# Altium schematic symbol library APE-SBC.SchLib: 66 symbols
Pins are listed as number, name and electrical type; pins without a type are passive.

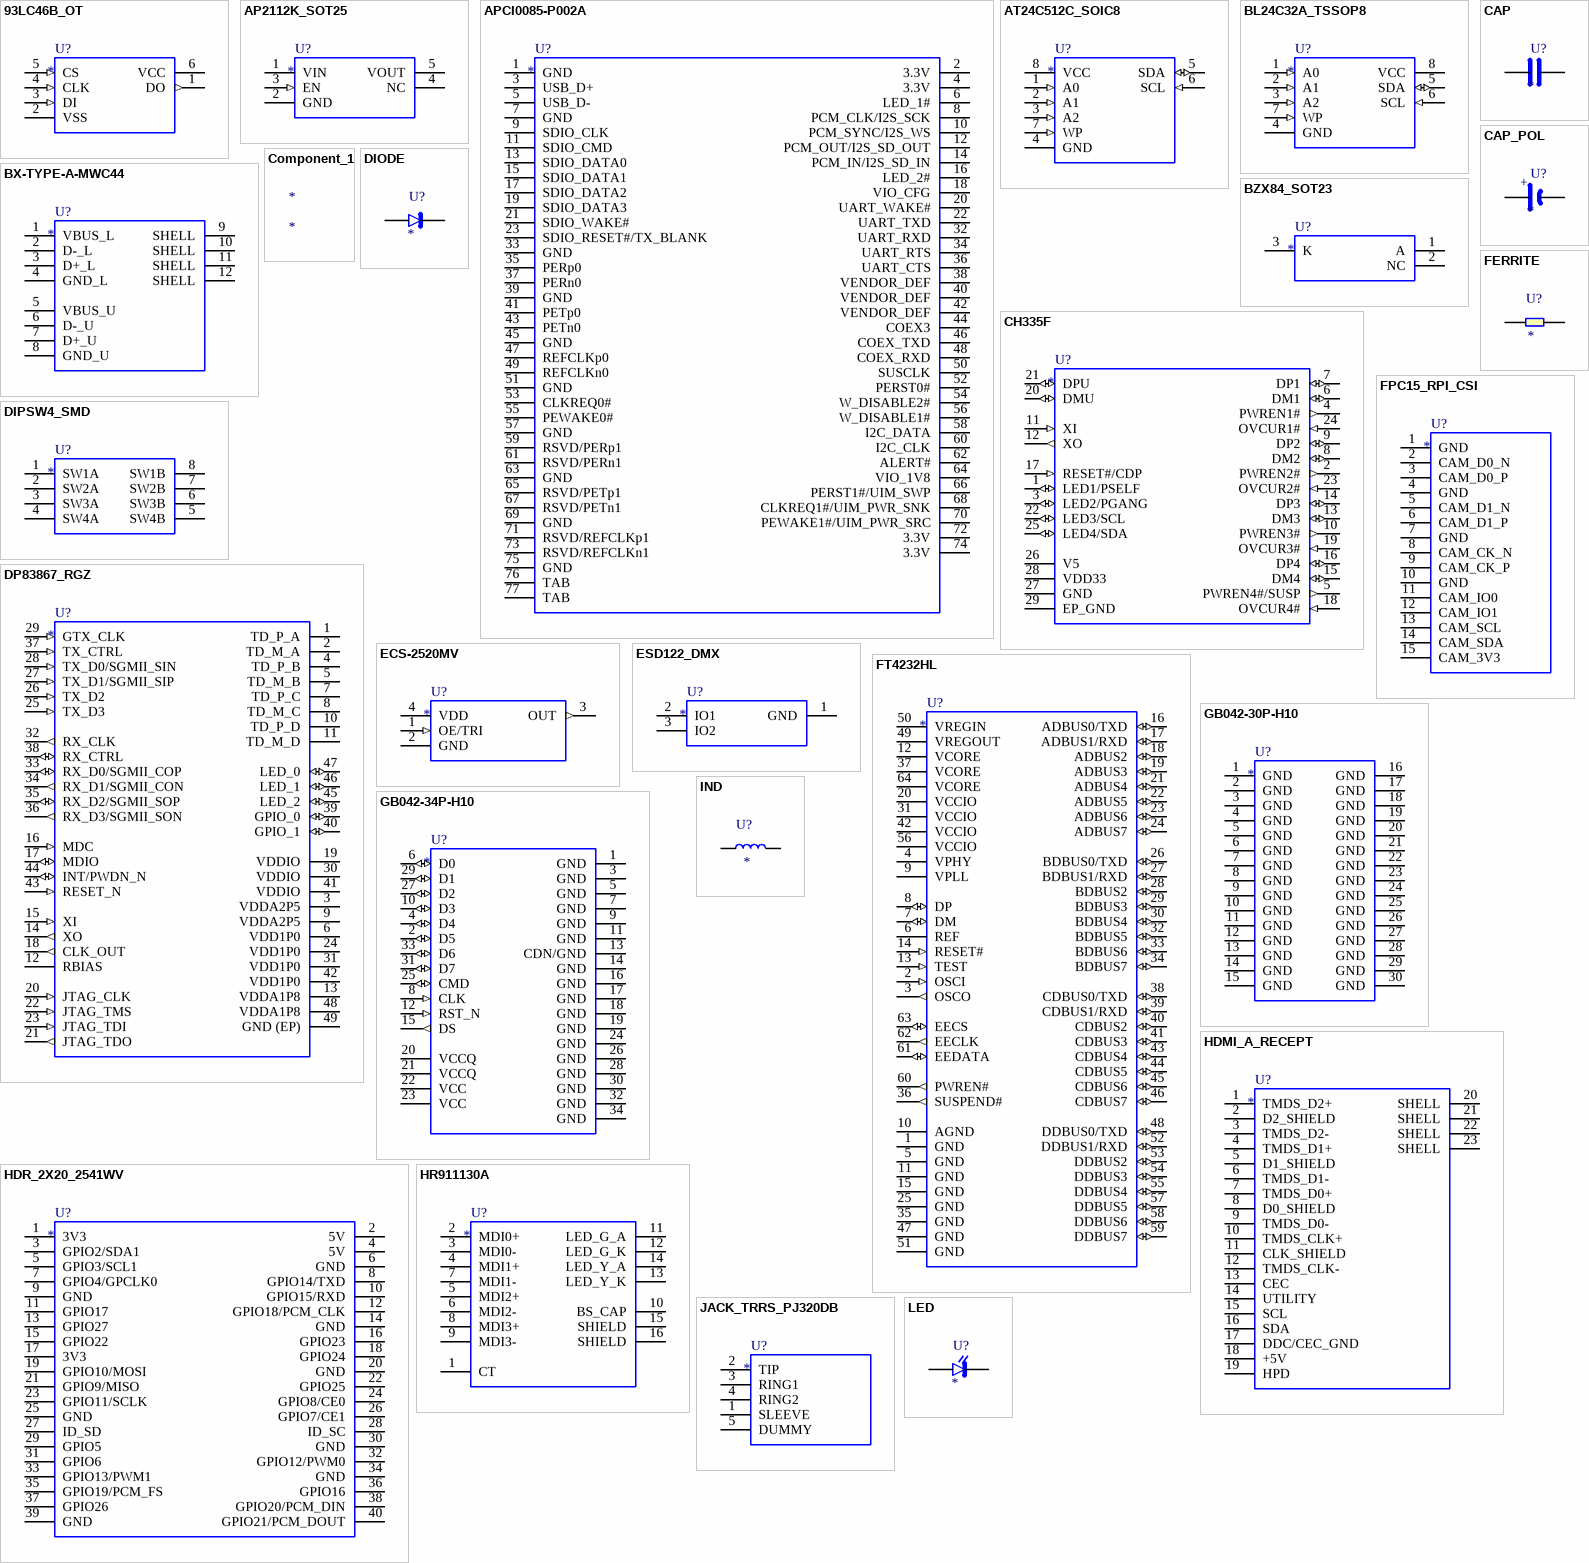
[diagram p0: symbols 93LC46B_OT to LED]

## 93LC46B_OT
designator U?
93LC46B 1 Kbit Microwire EEPROM (64 x 16), SOT-23-6
pins: 1 DO (out), 2 VSS (power), 3 DI (in), 4 CLK (in), 5 CS (in), 6 VCC (power)

## AP2112K_SOT25
designator U?
AP2112K 600 mA CMOS LDO, fixed output, SOT-23-5
pins: 1 VIN (power), 2 GND (power), 3 EN (in), 4 NC, 5 VOUT (power)

## APCI0085-P002A
designator U?
M.2 Key-E socket, 67 contacts 0.5 mm, H3.2, 2 SMT tabs (LOTES APCI0085-P002A)
pins: 1 GND (power), 2 3.3V (power), 3 USB_D+, 4 3.3V (power), 5 USB_D-, 6 LED_1#, 7 GND (power), 8 PCM_CLK/I2S_SCK, 9 SDIO_CLK, 10 PCM_SYNC/I2S_WS, 11 SDIO_CMD, 12 PCM_OUT/I2S_SD_OUT, 13 SDIO_DATA0, 14 PCM_IN/I2S_SD_IN, 15 SDIO_DATA1, 16 LED_2#, 17 SDIO_DATA2, 18 VIO_CFG, 19 SDIO_DATA3, 20 UART_WAKE#, 21 SDIO_WAKE#, 22 UART_TXD, 23 SDIO_RESET#/TX_BLANK, 32 UART_RXD, 33 GND (power), 34 UART_RTS, 35 PERp0, 36 UART_CTS, 37 PERn0, 38 VENDOR_DEF, 39 GND (power), 40 VENDOR_DEF, 41 PETp0, 42 VENDOR_DEF, 43 PETn0, 44 COEX3, 45 GND (power), 46 COEX_TXD, 47 REFCLKp0, 48 COEX_RXD, 49 REFCLKn0, 50 SUSCLK, 51 GND (power), 52 PERST0#, 53 CLKREQ0#, 54 W_DISABLE2#, 55 PEWAKE0#, 56 W_DISABLE1#, 57 GND (power), 58 I2C_DATA, 59 RSVD/PERp1, 60 I2C_CLK, 61 RSVD/PERn1, 62 ALERT#, 63 GND (power), 64 VIO_1V8 (power), 65 RSVD/PETp1, 66 PERST1#/UIM_SWP, 67 RSVD/PETn1, 68 CLKREQ1#/UIM_PWR_SNK, 69 GND (power), 70 PEWAKE1#/UIM_PWR_SRC, 71 RSVD/REFCLKp1, 72 3.3V (power), 73 RSVD/REFCLKn1, 74 3.3V (power), 75 GND (power), 76 TAB (power), 77 TAB (power)

## AT24C512C_SOIC8
designator U?
512 Kbit I2C EEPROM, SOIC-8 (SSHD: 2.5-5.5 V)
pins: 1 A0 (in), 2 A1 (in), 3 A2 (in), 4 GND (power), 5 SDA (io), 6 SCL (in), 7 WP (in), 8 VCC (power)

## BL24C32A_TSSOP8
designator U?
BL24C32A 32 Kbit I2C EEPROM (2-byte address), TSSOP-8
pins: 1 A0 (in), 2 A1 (in), 3 A2 (in), 4 GND (power), 5 SDA (io), 6 SCL (in), 7 WP (in), 8 VCC (power)

## BX-TYPE-A-MWC44
designator U?
Dual stacked USB 2.0 Type-A receptacle, THT right angle (Bossie BX-TYPE-A-MWC44)
pins: 1 VBUS_L (power), 2 D-_L, 3 D+_L, 4 GND_L (power), 5 VBUS_U (power), 6 D-_U, 7 D+_U, 8 GND_U (power), 9 SHELL, 10 SHELL, 11 SHELL, 12 SHELL

## BZX84_SOT23
designator U?
Zener diode SOT-23 (1 = anode, 2 = NC, 3 = cathode)
pins: 1 A, 2 NC, 3 K

## CAP
designator U?
Capacitor, non-polarized
pins: 1, 2

## CAP_POL
designator U?
Capacitor, polarized (pin 1 = +)
pins: 1, 2
text: +

## CH335F
designator U?
WCH CH335F USB 2.0 HS 4-port MTT hub, per-port power/OC, QFN-28 4x4
pins: 1 LED1/PSELF (io), 2 PWREN2# (out), 3 LED2/PGANG (io), 4 PWREN1# (out), 5 PWREN4#/SUSP (out), 6 DM1 (io), 7 DP1 (io), 8 DM2 (io), 9 DP2 (io), 10 PWREN3# (out), 11 XI (in), 12 XO (out), 13 DM3 (io), 14 DP3 (io), 15 DM4 (io), 16 DP4 (io), 17 RESET#/CDP (in), 18 OVCUR4# (in), 19 OVCUR3# (in), 20 DMU (io), 21 DPU (io), 22 LED3/SCL (io), 23 OVCUR2# (in), 24 OVCUR1# (in), 25 LED4/SDA (io), 26 V5 (power), 27 GND (power), 28 VDD33 (power), 29 EP_GND (power)

## Component_1
designator *

## DIODE
designator U?
Diode (pin 1 = anode)
pins: 1 A, 2 K

## DIPSW4_SMD
designator U?
DIP switch 4-position SPST, 2.54 mm SMD (pos k = pins k / 9-k)
pins: 1 SW1A, 2 SW2A, 3 SW3A, 4 SW4A, 5 SW4B, 6 SW3B, 7 SW2B, 8 SW1B

## DP83867_RGZ
designator U?
DP83867IS/E/CS 10/100/1000 Ethernet PHY, RGMII/SGMII, VQFN-48 RGZ
pins: 1 TD_P_A, 2 TD_M_A, 3 VDDA2P5 (power), 4 TD_P_B, 5 TD_M_B, 6 VDD1P0 (power), 7 TD_P_C, 8 TD_M_C, 9 VDDA2P5 (power), 10 TD_P_D, 11 TD_M_D, 12 RBIAS, 13 VDDA1P8 (power), 14 XO (out), 15 XI (in), 16 MDC (in), 17 MDIO (io), 18 CLK_OUT (out), 19 VDDIO (power), 20 JTAG_CLK (in), 21 JTAG_TDO (out), 22 JTAG_TMS (in), 23 JTAG_TDI (in), 24 VDD1P0 (power), 25 TX_D3 (in), 26 TX_D2 (in), 27 TX_D1/SGMII_SIP (in), 28 TX_D0/SGMII_SIN (in), 29 GTX_CLK (in), 30 VDDIO (power), 31 VDD1P0 (power), 32 RX_CLK (out), 33 RX_D0/SGMII_COP (io), 34 RX_D1/SGMII_CON (out), 35 RX_D2/SGMII_SOP (io), 36 RX_D3/SGMII_SON (out), 37 TX_CTRL (in), 38 RX_CTRL (io), 39 GPIO_0 (io), 40 GPIO_1 (io), 41 VDDIO (power), 42 VDD1P0 (power), 43 RESET_N (in), 44 INT/PWDN_N (io), 45 LED_2 (io), 46 LED_1 (io), 47 LED_0 (io), 48 VDDA1P8 (power), 49 GND (EP) (power)

## ECS-2520MV
designator U?
25 MHz HCMOS oscillator 1.6-3.6 V, 2.5x2.0 mm SMD-4
pins: 1 OE/TRI (in), 2 GND (power), 3 OUT (out), 4 VDD (power)

## ESD122_DMX
designator U?
ESD122 2-channel 0.2 pF bidirectional ESD diode, X2SON-3 (DMX)
pins: 1 GND (power), 2 IO1, 3 IO2

## FERRITE
designator U?
Ferrite bead
pins: 1, 2

## FPC15_RPI_CSI
designator U?
15-pin 1.0 mm FPC, Raspberry Pi camera pinout (TE 1-1734248-5)
pins: 1 GND, 2 CAM_D0_N, 3 CAM_D0_P, 4 GND, 5 CAM_D1_N, 6 CAM_D1_P, 7 GND, 8 CAM_CK_N, 9 CAM_CK_P, 10 GND, 11 CAM_IO0, 12 CAM_IO1, 13 CAM_SCL, 14 CAM_SDA, 15 CAM_3V3

## FT4232HL
designator U?
FT4232H quad Hi-Speed USB to UART/MPSSE, LQFP-64
pins: 1 GND (power), 2 OSCI (in), 3 OSCO (out), 4 VPHY (power), 5 GND (power), 6 REF, 7 DM (io), 8 DP (io), 9 VPLL (power), 10 AGND (power), 11 GND (power), 12 VCORE (power), 13 TEST (in), 14 RESET# (in), 15 GND (power), 16 ADBUS0/TXD (io), 17 ADBUS1/RXD (io), 18 ADBUS2 (io), 19 ADBUS3 (io), 20 VCCIO (power), 21 ADBUS4 (io), 22 ADBUS5 (io), 23 ADBUS6 (io), 24 ADBUS7 (io), 25 GND (power), 26 BDBUS0/TXD (io), 27 BDBUS1/RXD (io), 28 BDBUS2 (io), 29 BDBUS3 (io), 30 BDBUS4 (io), 31 VCCIO (power), 32 BDBUS5 (io), 33 BDBUS6 (io), 34 BDBUS7 (io), 35 GND (power), 36 SUSPEND# (out), 37 VCORE (power), 38 CDBUS0/TXD (io), 39 CDBUS1/RXD (io), 40 CDBUS2 (io), 41 CDBUS3 (io), 42 VCCIO (power), 43 CDBUS4 (io), 44 CDBUS5 (io), 45 CDBUS6 (io), 46 CDBUS7 (io), 47 GND (power), 48 DDBUS0/TXD (io), 49 VREGOUT (power), 50 VREGIN (power), 51 GND (power), 52 DDBUS1/RXD (io), 53 DDBUS2 (io), 54 DDBUS3 (io), 55 DDBUS4 (io), 56 VCCIO (power), 57 DDBUS5 (io), 58 DDBUS6 (io), 59 DDBUS7 (io), 60 PWREN# (out), 61 EEDATA (io), 62 EECLK (out), 63 EECS (io), 64 VCORE (power)

## GB042-30P-H10
designator U?
eMMC-module retention connector, LS Mtron GB042 30-pin 0.4 mm B2B plug (mechanical, all GND)
pins: 1 GND, 2 GND, 3 GND, 4 GND, 5 GND, 6 GND, 7 GND, 8 GND, 9 GND, 10 GND, 11 GND, 12 GND, 13 GND, 14 GND, 15 GND, 16 GND, 17 GND, 18 GND, 19 GND, 20 GND, 21 GND, 22 GND, 23 GND, 24 GND, 25 GND, 26 GND, 27 GND, 28 GND, 29 GND, 30 GND

## GB042-34P-H10
designator U?
eMMC-module connector, LS Mtron GB042 34-pin 0.4 mm B2B plug (Odroid/Radxa/PINE64 pinout)
pins: 1 GND (power), 2 D5 (io), 3 GND (power), 4 D4 (io), 5 GND (power), 6 D0 (io), 7 GND (power), 8 CLK (in), 9 GND (power), 10 D3 (io), 11 GND (power), 12 RST_N (in), 13 CDN/GND, 14 GND (power), 15 DS (out), 16 GND (power), 17 GND (power), 18 GND (power), 19 GND (power), 20 VCCQ (power), 21 VCCQ (power), 22 VCC (power), 23 VCC (power), 24 GND (power), 25 CMD (io), 26 GND (power), 27 D2 (io), 28 GND (power), 29 D1 (io), 30 GND (power), 31 D7 (io), 32 GND (power), 33 D6 (io), 34 GND (power)

## HDMI_A_RECEPT
designator U?
HDMI type-A receptacle, 19 pin + shell (XFCN HDMI-A-19F-S-D)
pins: 1 TMDS_D2+, 2 D2_SHIELD, 3 TMDS_D2-, 4 TMDS_D1+, 5 D1_SHIELD, 6 TMDS_D1-, 7 TMDS_D0+, 8 D0_SHIELD, 9 TMDS_D0-, 10 TMDS_CLK+, 11 CLK_SHIELD, 12 TMDS_CLK-, 13 CEC, 14 UTILITY, 15 SCL, 16 SDA, 17 DDC/CEC_GND, 18 +5V, 19 HPD, 20 SHELL, 21 SHELL, 22 SHELL, 23 SHELL

## HDR_2X20_2541WV
designator U?
Pin header 2x20 2.54 mm, Raspberry Pi 40-pin numbering
pins: 1 3V3, 2 5V, 3 GPIO2/SDA1, 4 5V, 5 GPIO3/SCL1, 6 GND, 7 GPIO4/GPCLK0, 8 GPIO14/TXD, 9 GND, 10 GPIO15/RXD, 11 GPIO17, 12 GPIO18/PCM_CLK, 13 GPIO27, 14 GND, 15 GPIO22, 16 GPIO23, 17 3V3, 18 GPIO24, 19 GPIO10/MOSI, 20 GND, 21 GPIO9/MISO, 22 GPIO25, 23 GPIO11/SCLK, 24 GPIO8/CE0, 25 GND, 26 GPIO7/CE1, 27 ID_SD, 28 ID_SC, 29 GPIO5, 30 GND, 31 GPIO6, 32 GPIO12/PWM0, 33 GPIO13/PWM1, 34 GND, 35 GPIO19/PCM_FS, 36 GPIO16, 37 GPIO26, 38 GPIO20/PCM_DIN, 39 GND, 40 GPIO21/PCM_DOUT

## HR911130A
designator U?
RJ45 MagJack, 1000BASE-T 1CT:1CT magnetics, green/yellow LEDs, shielded (HanRun HR911130A)
pins: 1 CT, 2 MDI0+, 3 MDI0-, 4 MDI1+, 5 MDI2+, 6 MDI2-, 7 MDI1-, 8 MDI3+, 9 MDI3-, 10 BS_CAP, 11 LED_G_A, 12 LED_G_K, 13 LED_Y_K, 14 LED_Y_A, 15 SHIELD, 16 SHIELD

## IND
designator U?
Inductor
pins: 1, 2

## JACK_TRRS_PJ320DB
designator U?
3.5 mm TRRS jack, SMD, no switch (PJ-320DB-5A)
pins: 1 SLEEVE, 2 TIP, 3 RING1, 4 RING2, 5 DUMMY

## LED
designator U?
LED (pin 1 = anode)
pins: 1 A, 2 K

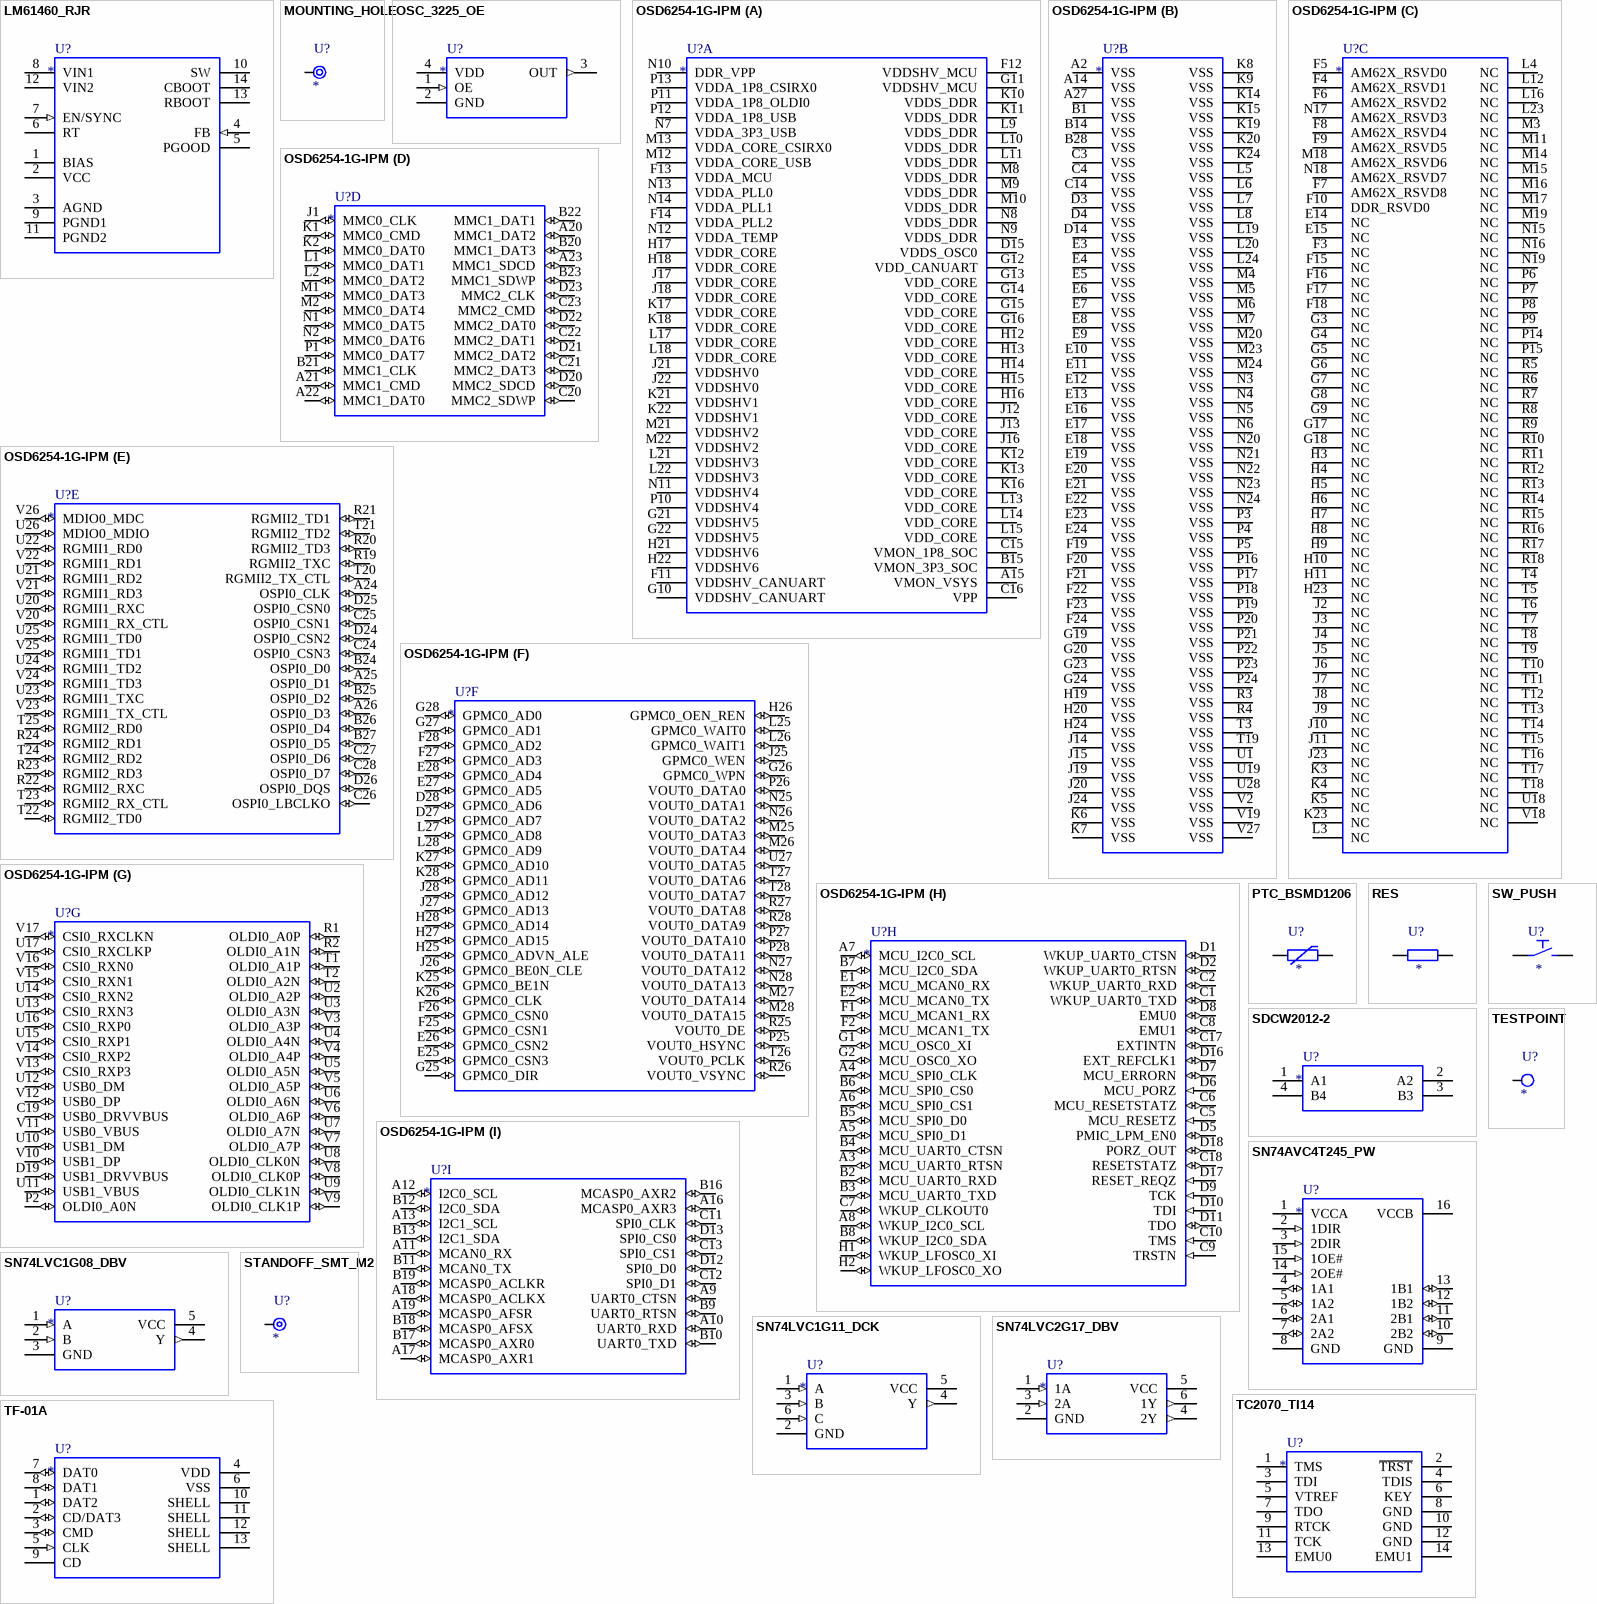
[diagram p1: symbols LM61460_RJR to TF-01A]

## LM61460_RJR
designator U?
LM61460 36 V 6 A synchronous buck, adjustable, VQFN-HR-14 RJR
pins: 1 BIAS (power), 2 VCC, 3 AGND (power), 4 FB (in), 5 PGOOD (oc), 6 RT, 7 EN/SYNC (in), 8 VIN1 (power), 9 PGND1 (power), 10 SW, 11 PGND2 (power), 12 VIN2 (power), 13 RBOOT, 14 CBOOT

## MOUNTING_HOLE
designator U?
Plated mounting hole (pin to GND)
pins: 1 MH

## OSC_3225_OE
designator U?
LVCMOS oscillator with output enable, 3.2x2.5 mm 4-pad
pins: 1 OE (in), 2 GND (power), 3 OUT (out), 4 VDD (power)

## OSD6254-1G-IPM
designator U?
Octavo OSD6254 SiP: TI AM6254 + 1 GB DDR4, 9x14 mm 500-ball 0.5 mm BGA
part A pins: A15 VMON_VSYS (power), B15 VMON_3P3_SOC (power), C15 VMON_1P8_SOC (power), C16 VPP (power), D15 VDDS_OSC0 (power), F11 VDDSHV_CANUART (power), F12 VDDSHV_MCU (power), F13 VDDA_MCU (power), F14 VDDA_PLL2 (power), G10 VDDSHV_CANUART (power), G11 VDDSHV_MCU (power), G12 VDD_CANUART (power), G13 VDD_CORE (power), G14 VDD_CORE (power), G15 VDD_CORE (power), G16 VDD_CORE (power), G21 VDDSHV5 (power), G22 VDDSHV5 (power), H12 VDD_CORE (power), H13 VDD_CORE (power), H14 VDD_CORE (power), H15 VDD_CORE (power), H16 VDD_CORE (power), H17 VDDR_CORE (power), H18 VDDR_CORE (power), H21 VDDSHV6 (power), H22 VDDSHV6 (power), J12 VDD_CORE (power), J13 VDD_CORE (power), J16 VDD_CORE (power), J17 VDDR_CORE (power), J18 VDDR_CORE (power), J21 VDDSHV0 (power), J22 VDDSHV0 (power), K10 VDDS_DDR (power), K11 VDDS_DDR (power), K12 VDD_CORE (power), K13 VDD_CORE (power), K16 VDD_CORE (power), K17 VDDR_CORE (power), K18 VDDR_CORE (power), K21 VDDSHV1 (power), K22 VDDSHV1 (power), L9 VDDS_DDR (power), L10 VDDS_DDR (power), L11 VDDS_DDR (power), L13 VDD_CORE (power), L14 VDD_CORE (power), L15 VDD_CORE (power), L17 VDDR_CORE (power), L18 VDDR_CORE (power), L21 VDDSHV3 (power), L22 VDDSHV3 (power), M8 VDDS_DDR (power), M9 VDDS_DDR (power), M10 VDDS_DDR (power), M12 VDDA_CORE_USB (power), M13 VDDA_CORE_CSIRX0 (power), M21 VDDSHV2 (power), M22 VDDSHV2 (power), N7 VDDA_3P3_USB (power), N8 VDDS_DDR (power), N9 VDDS_DDR (power), N10 DDR_VPP (power), N11 VDDSHV4 (power), N12 VDDA_TEMP (power), N13 VDDA_PLL0 (power), N14 VDDA_PLL1 (power), P10 VDDSHV4 (power), P11 VDDA_1P8_OLDI0 (power), P12 VDDA_1P8_USB (power), P13 VDDA_1P8_CSIRX0 (power)
part B pins: A2 VSS (power), A14 VSS (power), A27 VSS (power), B1 VSS (power), B14 VSS (power), B28 VSS (power), C3 VSS (power), C4 VSS (power), C14 VSS (power), D3 VSS (power), D4 VSS (power), D14 VSS (power), E3 VSS (power), E4 VSS (power), E5 VSS (power), E6 VSS (power), E7 VSS (power), E8 VSS (power), E9 VSS (power), E10 VSS (power), E11 VSS (power), E12 VSS (power), E13 VSS (power), E16 VSS (power), E17 VSS (power), E18 VSS (power), E19 VSS (power), E20 VSS (power), E21 VSS (power), E22 VSS (power), E23 VSS (power), E24 VSS (power), F19 VSS (power), F20 VSS (power), F21 VSS (power), F22 VSS (power), F23 VSS (power), F24 VSS (power), G19 VSS (power), G20 VSS (power), G23 VSS (power), G24 VSS (power), H19 VSS (power), H20 VSS (power), H24 VSS (power), J14 VSS (power), J15 VSS (power), J19 VSS (power), J20 VSS (power), J24 VSS (power), K6 VSS (power), K7 VSS (power), K8 VSS (power), K9 VSS (power), K14 VSS (power), K15 VSS (power), K19 VSS (power), K20 VSS (power), K24 VSS (power), L5 VSS (power), L6 VSS (power), L7 VSS (power), L8 VSS (power), L19 VSS (power), L20 VSS (power), L24 VSS (power), M4 VSS (power), M5 VSS (power), M6 VSS (power), M7 VSS (power), M20 VSS (power), M23 VSS (power), M24 VSS (power), N3 VSS (power), N4 VSS (power), N5 VSS (power), N6 VSS (power), N20 VSS (power), N21 VSS (power), N22 VSS (power), N23 VSS (power), N24 VSS (power), P3 VSS (power), P4 VSS (power), P5 VSS (power), P16 VSS (power), P17 VSS (power), P18 VSS (power), P19 VSS (power), P20 VSS (power), P21 VSS (power), P22 VSS (power), P23 VSS (power), P24 VSS (power), R3 VSS (power), R4 VSS (power), T3 VSS (power), T19 VSS (power), U1 VSS (power), U19 VSS (power), U28 VSS (power), V2 VSS (power), V19 VSS (power), V27 VSS (power)
part C pins: E14 NC, E15 NC, F3 NC, F4 AM62X_RSVD1, F5 AM62X_RSVD0, F6 AM62X_RSVD2, F7 AM62X_RSVD8, F8 AM62X_RSVD4, F9 AM62X_RSVD5, F10 DDR_RSVD0, F15 NC, F16 NC, F17 NC, F18 NC, G3 NC, G4 NC, G5 NC, G6 NC, G7 NC, G8 NC, G9 NC, G17 NC, G18 NC, H3 NC, H4 NC, H5 NC, H6 NC, H7 NC, H8 NC, H9 NC, H10 NC, H11 NC, H23 NC, J2 NC, J3 NC, J4 NC, J5 NC, J6 NC, J7 NC, J8 NC, J9 NC, J10 NC, J11 NC, J23 NC, K3 NC, K4 NC, K5 NC, K23 NC, L3 NC, L4 NC, L12 NC, L16 NC, L23 NC, M3 NC, M11 NC, M14 NC, M15 NC, M16 NC, M17 NC, M18 AM62X_RSVD6, M19 NC, N15 NC, N16 NC, N17 AM62X_RSVD3, N18 AM62X_RSVD7, N19 NC, P6 NC, P7 NC, P8 NC, P9 NC, P14 NC, P15 NC, R5 NC, R6 NC, R7 NC, R8 NC, R9 NC, R10 NC, R11 NC, R12 NC, R13 NC, R14 NC, R15 NC, R16 NC, R17 NC, R18 NC, T4 NC, T5 NC, T6 NC, T7 NC, T8 NC, T9 NC, T10 NC, T11 NC, T12 NC, T13 NC, T14 NC, T15 NC, T16 NC, T17 NC, T18 NC, U18 NC, V18 NC
part D pins: A20 MMC1_DAT2 (io), A21 MMC1_CMD (io), A22 MMC1_DAT0 (io), A23 MMC1_SDCD (io), B20 MMC1_DAT3 (io), B21 MMC1_CLK (io), B22 MMC1_DAT1 (io), B23 MMC1_SDWP (io), C20 MMC2_SDWP (io), C21 MMC2_DAT3 (io), C22 MMC2_DAT1 (io), C23 MMC2_CMD (io), D20 MMC2_SDCD (io), D21 MMC2_DAT2 (io), D22 MMC2_DAT0 (io), D23 MMC2_CLK (io), J1 MMC0_CLK (io), K1 MMC0_CMD (io), K2 MMC0_DAT0 (io), L1 MMC0_DAT1 (io), L2 MMC0_DAT2 (io), M1 MMC0_DAT3 (io), M2 MMC0_DAT4 (io), N1 MMC0_DAT5 (io), N2 MMC0_DAT6 (io), P1 MMC0_DAT7 (io)
part E pins: A24 OSPI0_CLK (io), A25 OSPI0_D1 (io), A26 OSPI0_D3 (io), B24 OSPI0_D0 (io), B25 OSPI0_D2 (io), B26 OSPI0_D4 (io), B27 OSPI0_D5 (io), C24 OSPI0_CSN3 (io), C25 OSPI0_CSN1 (io), C26 OSPI0_LBCLKO (io), C27 OSPI0_D6 (io), C28 OSPI0_D7 (io), D24 OSPI0_CSN2 (io), D25 OSPI0_CSN0 (io), D26 OSPI0_DQS (io), R19 RGMII2_TXC (io), R20 RGMII2_TD3 (io), R21 RGMII2_TD1 (io), R22 RGMII2_RXC (io), R23 RGMII2_RD3 (io), R24 RGMII2_RD1 (io), T20 RGMII2_TX_CTL (io), T21 RGMII2_TD2 (io), T22 RGMII2_TD0 (io), T23 RGMII2_RX_CTL (io), T24 RGMII2_RD2 (io), T25 RGMII2_RD0 (io), U20 RGMII1_RXC (io), U21 RGMII1_RD2 (io), U22 RGMII1_RD0 (io), U23 RGMII1_TXC (io), U24 RGMII1_TD2 (io), U25 RGMII1_TD0 (io), U26 MDIO0_MDIO (io), V20 RGMII1_RX_CTL (io), V21 RGMII1_RD3 (io), V22 RGMII1_RD1 (io), V23 RGMII1_TX_CTL (io), V24 RGMII1_TD3 (io), V25 RGMII1_TD1 (io), V26 MDIO0_MDC (io)
part F pins: D27 GPMC0_AD7 (io), D28 GPMC0_AD6 (io), E25 GPMC0_CSN3 (io), E26 GPMC0_CSN2 (io), E27 GPMC0_AD5 (io), E28 GPMC0_AD4 (io), F25 GPMC0_CSN1 (io), F26 GPMC0_CSN0 (io), F27 GPMC0_AD3 (io), F28 GPMC0_AD2 (io), G25 GPMC0_DIR (io), G26 GPMC0_WPN (io), G27 GPMC0_AD1 (io), G28 GPMC0_AD0 (io), H25 GPMC0_ADVN_ALE (io), H26 GPMC0_OEN_REN (io), H27 GPMC0_AD15 (io), H28 GPMC0_AD14 (io), J25 GPMC0_WEN (io), J26 GPMC0_BE0N_CLE (io), J27 GPMC0_AD13 (io), J28 GPMC0_AD12 (io), K25 GPMC0_BE1N (io), K26 GPMC0_CLK (io), K27 GPMC0_AD10 (io), K28 GPMC0_AD11 (io), L25 GPMC0_WAIT0 (io), L26 GPMC0_WAIT1 (io), L27 GPMC0_AD8 (io), L28 GPMC0_AD9 (io), M25 VOUT0_DATA3 (io), M26 VOUT0_DATA4 (io), M27 VOUT0_DATA14 (io), M28 VOUT0_DATA15 (io), N25 VOUT0_DATA1 (io), N26 VOUT0_DATA2 (io), N27 VOUT0_DATA12 (io), N28 VOUT0_DATA13 (io), P25 VOUT0_HSYNC (io), P26 VOUT0_DATA0 (io), P27 VOUT0_DATA10 (io), P28 VOUT0_DATA11 (io), R25 VOUT0_DE (io), R26 VOUT0_VSYNC (io), R27 VOUT0_DATA8 (io), R28 VOUT0_DATA9 (io), T26 VOUT0_PCLK (io), T27 VOUT0_DATA6 (io), T28 VOUT0_DATA7 (io), U27 VOUT0_DATA5 (io)
part G pins: C19 USB0_DRVVBUS (io), D19 USB1_DRVVBUS (io), P2 OLDI0_A0N (io), R1 OLDI0_A0P (io), R2 OLDI0_A1N (io), T1 OLDI0_A1P (io), T2 OLDI0_A2N (io), U2 OLDI0_A2P (io), U3 OLDI0_A3N (io), U4 OLDI0_A4N (io), U5 OLDI0_A5N (io), U6 OLDI0_A6N (io), U7 OLDI0_A7N (io), U8 OLDI0_CLK0N (io), U9 OLDI0_CLK1N (io), U10 USB1_DM (io), U11 USB1_VBUS (io), U12 USB0_DM (io), U13 CSI0_RXN3 (io), U14 CSI0_RXN2 (io), U15 CSI0_RXP1 (io), U16 CSI0_RXP0 (io), U17 CSI0_RXCLKP (io), V3 OLDI0_A3P (io), V4 OLDI0_A4P (io), V5 OLDI0_A5P (io), V6 OLDI0_A6P (io), V7 OLDI0_A7P (io), V8 OLDI0_CLK0P (io), V9 OLDI0_CLK1P (io), V10 USB1_DP (io), V11 USB0_VBUS (io), V12 USB0_DP (io), V13 CSI0_RXP3 (io), V14 CSI0_RXP2 (io), V15 CSI0_RXN1 (io), V16 CSI0_RXN0 (io), V17 CSI0_RXCLKN (io)
part H pins: A3 MCU_UART0_RTSN (io), A4 MCU_SPI0_CLK (io), A5 MCU_SPI0_D1 (io), A6 MCU_SPI0_CS1 (io), A7 MCU_I2C0_SCL (io), A8 WKUP_I2C0_SCL (io), B2 MCU_UART0_RXD (io), B3 MCU_UART0_TXD (io), B4 MCU_UART0_CTSN (io), B5 MCU_SPI0_D0 (io), B6 MCU_SPI0_CS0 (io), B7 MCU_I2C0_SDA (io), B8 WKUP_I2C0_SDA (io), C1 WKUP_UART0_TXD (io), C2 WKUP_UART0_RXD (io), C5 MCU_RESETZ (in), C6 MCU_RESETSTATZ (io), C7 WKUP_CLKOUT0 (io), C8 EMU1 (io), C9 TRSTN (in), C10 TMS (in), C17 EXTINTN (io), C18 RESETSTATZ (io), D1 WKUP_UART0_CTSN (io), D2 WKUP_UART0_RTSN (io), D5 PMIC_LPM_EN0 (io), D6 MCU_PORZ (in), D7 MCU_ERRORN (io), D8 EMU0 (io), D9 TCK (in), D10 TDI (in), D11 TDO (io), D16 EXT_REFCLK1 (io), D17 RESET_REQZ (in), D18 PORZ_OUT (io), E1 MCU_MCAN0_RX (io), E2 MCU_MCAN0_TX (io), F1 MCU_MCAN1_RX (io), F2 MCU_MCAN1_TX (io), G1 MCU_OSC0_XI (io), G2 MCU_OSC0_XO (io), H1 WKUP_LFOSC0_XI (io), H2 WKUP_LFOSC0_XO (io)
part I pins: A9 UART0_CTSN (io), A10 UART0_RXD (io), A11 MCAN0_RX (io), A12 I2C0_SCL (io), A13 I2C1_SCL (io), A16 MCASP0_AXR3 (io), A17 MCASP0_AXR1 (io), A18 MCASP0_ACLKX (io), A19 MCASP0_AFSR (io), B9 UART0_RTSN (io), B10 UART0_TXD (io), B11 MCAN0_TX (io), B12 I2C0_SDA (io), B13 I2C1_SDA (io), B16 MCASP0_AXR2 (io), B17 MCASP0_AXR0 (io), B18 MCASP0_AFSX (io), B19 MCASP0_ACLKR (io), C11 SPI0_CLK (io), C12 SPI0_D1 (io), C13 SPI0_CS1 (io), D12 SPI0_D0 (io), D13 SPI0_CS0 (io)

## PTC_BSMD1206
designator U?
PTC resettable fuse, 1206, not polarized
pins: 1, 2

## RES
designator U?
Resistor
pins: 1, 2

## SDCW2012-2
designator U?
Sunlord SDCW2012-2 wire-wound 2-line common-mode choke, 0805
pins: 1 A1, 2 A2, 3 B3, 4 B4

## SN74AVC4T245_PW
designator U?
Dual 2-bit dual-supply bus transceiver, Ioff + VCC isolation, TSSOP-16
pins: 1 VCCA (power), 2 1DIR (in), 3 2DIR (in), 4 1A1 (io), 5 1A2 (io), 6 2A1 (io), 7 2A2 (io), 8 GND (power), 9 GND (power), 10 2B2 (io), 11 2B1 (io), 12 1B2 (io), 13 1B1 (io), 14 2OE# (in), 15 1OE# (in), 16 VCCB (power)

## SN74LVC1G08_DBV
designator U?
Single 2-input AND gate, SOT-23-5
pins: 1 A (in), 2 B (in), 3 GND (power), 4 Y (out), 5 VCC (power)

## SN74LVC1G11_DCK
designator U?
Single 3-input AND gate, SC70-6
pins: 1 A (in), 2 GND (power), 3 B (in), 4 Y (out), 5 VCC (power), 6 C (in)

## SN74LVC2G17_DBV
designator U?
Dual Schmitt-trigger buffer, SOT-23-6
pins: 1 1A (in), 2 GND (power), 3 2A (in), 4 2Y (out), 5 VCC (power), 6 1Y (out)

## STANDOFF_SMT_M2
designator U?
SMT steel standoff, M2 thread (1 pad, to GND)
pins: 1 PAD

## SW_PUSH
designator U?
Push button, normally open
pins: 1, 2

## TC2070_TI14
designator U?
Tag-Connect TC2070-NL footprint, TI 14-pin JTAG pinout (pad 6 = KEY)
pins: 1 TMS, 2 ~{TRST}, 3 TDI, 4 TDIS, 5 VTREF, 6 KEY, 7 TDO, 8 GND, 9 RTCK, 10 GND, 11 TCK, 12 GND, 13 EMU0, 14 EMU1

## TESTPOINT
designator U?
Test point
pins: 1 TP

## TF-01A
designator U?
microSD push-push socket with card-detect switch (Hroparts TF-01A)
pins: 1 DAT2 (io), 2 CD/DAT3 (io), 3 CMD (io), 4 VDD (power), 5 CLK (in), 6 VSS (power), 7 DAT0 (io), 8 DAT1 (io), 9 CD, 10 SHELL, 11 SHELL, 12 SHELL, 13 SHELL

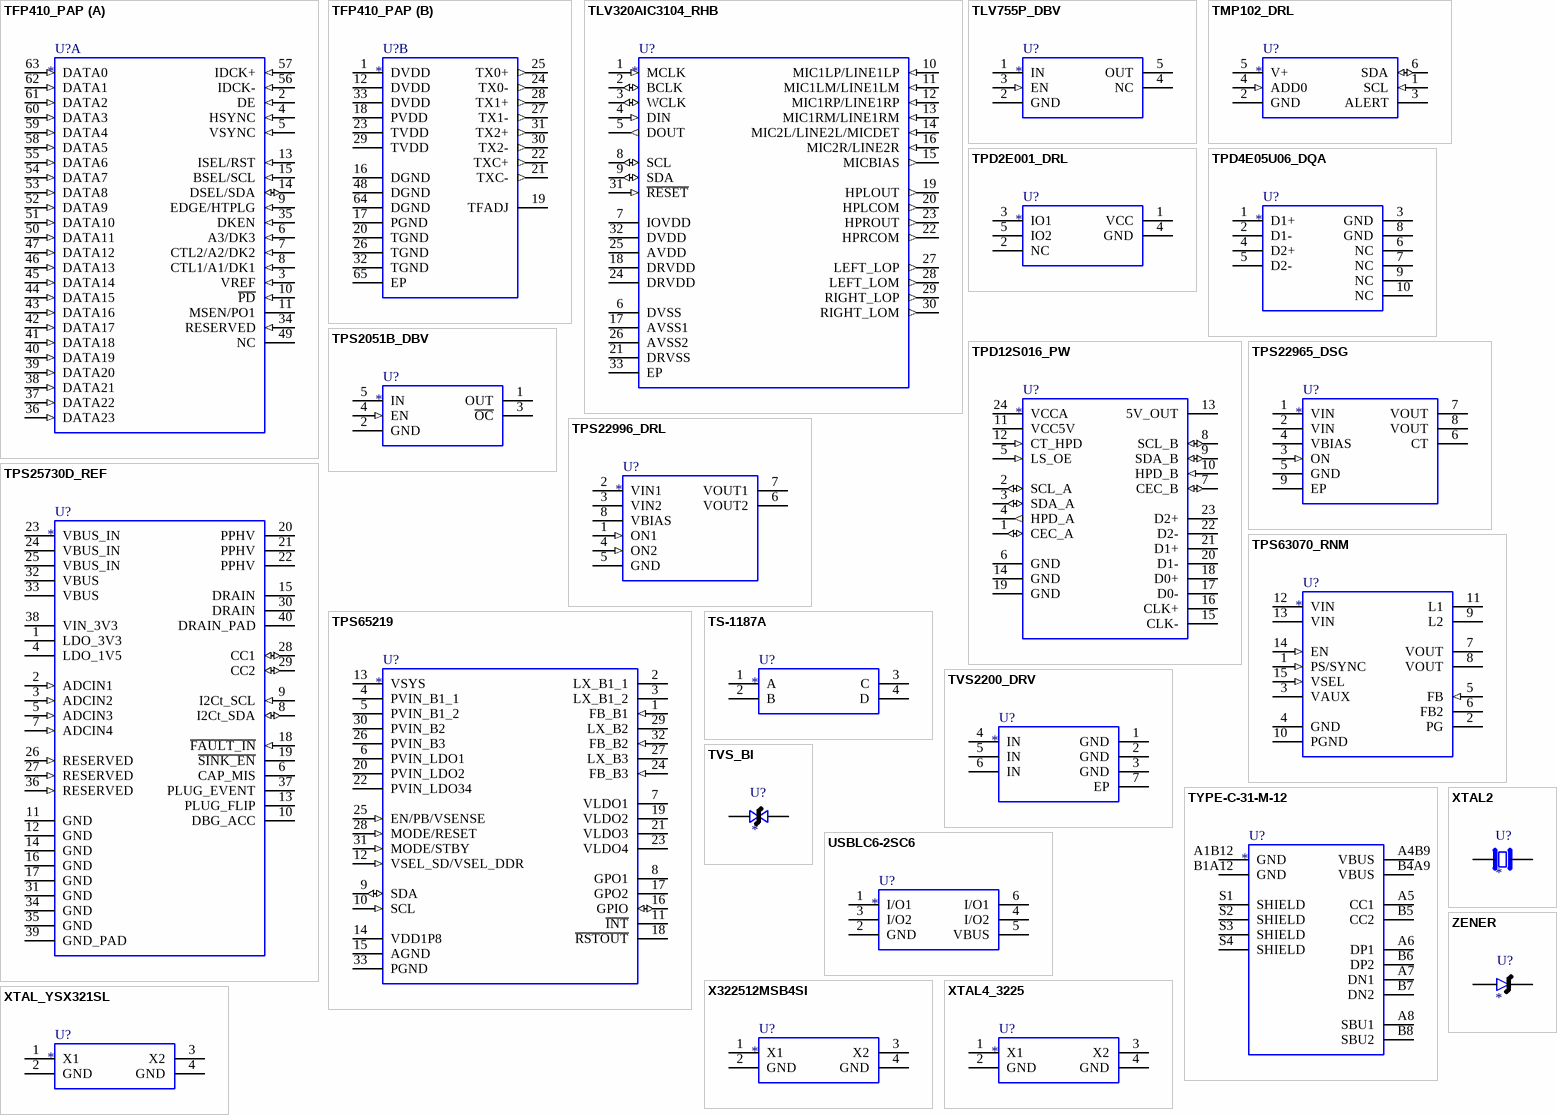
[diagram p2: symbols TFP410_PAP to ZENER]

## TFP410_PAP
designator U?
TI TFP410 DVI 1.0 transmitter, 24-bit DPI in, HTQFP-64 PowerPAD
part A pins: 2 DE (in), 3 VREF (in), 4 HSYNC (in), 5 VSYNC (in), 6 A3/DK3 (in), 7 CTL2/A2/DK2 (in), 8 CTL1/A1/DK1 (in), 9 EDGE/HTPLG (in), 10 ~{PD} (in), 11 MSEN/PO1 (oc), 13 ISEL/RST (in), 14 DSEL/SDA (io), 15 BSEL/SCL (in), 34 RESERVED (in), 35 DKEN (in), 36 DATA23 (in), 37 DATA22 (in), 38 DATA21 (in), 39 DATA20 (in), 40 DATA19 (in), 41 DATA18 (in), 42 DATA17 (in), 43 DATA16 (in), 44 DATA15 (in), 45 DATA14 (in), 46 DATA13 (in), 47 DATA12 (in), 49 NC, 50 DATA11 (in), 51 DATA10 (in), 52 DATA9 (in), 53 DATA8 (in), 54 DATA7 (in), 55 DATA6 (in), 56 IDCK- (in), 57 IDCK+ (in), 58 DATA5 (in), 59 DATA4 (in), 60 DATA3 (in), 61 DATA2 (in), 62 DATA1 (in), 63 DATA0 (in)
part B pins: 1 DVDD (power), 12 DVDD (power), 16 DGND (power), 17 PGND (power), 18 PVDD (power), 19 TFADJ, 20 TGND (power), 21 TXC- (out), 22 TXC+ (out), 23 TVDD (power), 24 TX0- (out), 25 TX0+ (out), 26 TGND (power), 27 TX1- (out), 28 TX1+ (out), 29 TVDD (power), 30 TX2- (out), 31 TX2+ (out), 32 TGND (power), 33 DVDD (power), 48 DGND (power), 64 DGND (power), 65 EP

## TLV320AIC3104_RHB
designator U?
TI TLV320AIC3104 low-power stereo codec, I2S + I2C, VQFN-32
pins: 1 MCLK (in), 2 BCLK (io), 3 WCLK (io), 4 DIN (in), 5 DOUT (out), 6 DVSS (power), 7 IOVDD (power), 8 SCL (io), 9 SDA (io), 10 MIC1LP/LINE1LP (in), 11 MIC1LM/LINE1LM (in), 12 MIC1RP/LINE1RP (in), 13 MIC1RM/LINE1RM (in), 14 MIC2L/LINE2L/MICDET (in), 15 MICBIAS (out), 16 MIC2R/LINE2R (in), 17 AVSS1 (power), 18 DRVDD (power), 19 HPLOUT (out), 20 HPLCOM (out), 21 DRVSS (power), 22 HPRCOM (out), 23 HPROUT (out), 24 DRVDD (power), 25 AVDD (power), 26 AVSS2 (power), 27 LEFT_LOP (out), 28 LEFT_LOM (out), 29 RIGHT_LOP (out), 30 RIGHT_LOM (out), 31 ~{RESET} (in), 32 DVDD (power), 33 EP

## TLV755P_DBV
designator U?
TLV755P 500 mA LDO, SOT-23-5 (fixed output per OPN)
pins: 1 IN (power), 2 GND (power), 3 EN (in), 4 NC, 5 OUT

## TMP102_DRL
designator U?
TMP102 digital temperature sensor, I2C, SOT-563
pins: 1 SCL (in), 2 GND (power), 3 ALERT (oc), 4 ADD0 (in), 5 V+ (power), 6 SDA (io)

## TPD2E001_DRL
designator U?
2-channel USB ESD array with VCC clamp rail, SOT-5 (DRL)
pins: 1 VCC (power), 2 NC, 3 IO1, 4 GND (power), 5 IO2

## TPD4E05U06_DQA
designator U?
4-channel 0.5 pF ESD array, USON-10
pins: 1 D1+, 2 D1-, 3 GND (power), 4 D2+, 5 D2-, 6 NC, 7 NC, 8 GND (power), 9 NC, 10 NC

## TPD12S016_PW
designator U?
TI TPD12S016 HDMI companion: 5 V load switch, DDC/CEC/HPD level shift, 12-ch ESD, TSSOP-24
pins: 1 CEC_A (io), 2 SCL_A (io), 3 SDA_A (io), 4 HPD_A (out), 5 LS_OE (in), 6 GND (power), 7 CEC_B (io), 8 SCL_B (io), 9 SDA_B (io), 10 HPD_B (in), 11 VCC5V (power), 12 CT_HPD (in), 13 5V_OUT (power), 14 GND (power), 15 CLK-, 16 CLK+, 17 D0-, 18 D0+, 19 GND (power), 20 D1-, 21 D1+, 22 D2-, 23 D2+, 24 VCCA (power)

## TPS2051B_DBV
designator U?
TPS2051B 0.5 A USB power switch, active-high EN, OC flag, SOT-23-5
pins: 1 OUT, 2 GND (power), 3 ~{OC} (oc), 4 EN (in), 5 IN (power)

## TPS22965_DSG
designator U?
TPS22965 5.7 V 4 A load switch with controlled rise time, WSON-8
pins: 1 VIN (power), 2 VIN (power), 3 ON (in), 4 VBIAS (power), 5 GND (power), 6 CT, 7 VOUT, 8 VOUT, 9 EP

## TPS22996_DRL
designator U?
TPS22996 dual 4 A load switch with QOD and ON-current set rise time, SOT-583-8
pins: 1 ON1 (in), 2 VIN1 (power), 3 VIN2 (power), 4 ON2 (in), 5 GND (power), 6 VOUT2, 7 VOUT1, 8 VBIAS (power)

## TPS25730D_REF
designator U?
TPS25730D USB-C PD sink controller, 5 A integrated power path, WQFN-38 REF
pins: 1 LDO_3V3, 2 ADCIN1 (in), 3 ADCIN2 (in), 4 LDO_1V5, 5 ADCIN3 (in), 6 CAP_MIS (oc), 7 ADCIN4 (in), 8 I2Ct_SDA (io), 9 I2Ct_SCL (in), 10 DBG_ACC (oc), 11 GND (power), 12 GND (power), 13 PLUG_FLIP (oc), 14 GND (power), 15 DRAIN, 16 GND (power), 17 GND (power), 18 ~{FAULT_IN} (in), 19 ~{SINK_EN} (oc), 20 PPHV, 21 PPHV, 22 PPHV, 23 VBUS_IN (power), 24 VBUS_IN (power), 25 VBUS_IN (power), 26 RESERVED (in), 27 RESERVED (in), 28 CC1 (io), 29 CC2 (io), 30 DRAIN, 31 GND (power), 32 VBUS (power), 33 VBUS (power), 34 GND (power), 35 GND (power), 36 RESERVED (in), 37 PLUG_EVENT (oc), 38 VIN_3V3 (power), 39 GND_PAD (power), 40 DRAIN_PAD

## TPS63070_RNM
designator U?
TPS63070 2-16 V 3.6 A buck-boost, adjustable, VQFN-HR-15 RNM
pins: 1 PS/SYNC (in), 2 PG (oc), 3 VAUX, 4 GND (power), 5 FB (in), 6 FB2, 7 VOUT, 8 VOUT, 9 L2, 10 PGND (power), 11 L1, 12 VIN (power), 13 VIN (power), 14 EN (in), 15 VSEL (in)

## TPS65219
designator U?
TPS65219 PMIC, 3 bucks + 4 LDOs, VQFN-32 RHB/RSM (NVM per OPN)
pins: 1 FB_B1 (in), 2 LX_B1_1, 3 LX_B1_2, 4 PVIN_B1_1 (power), 5 PVIN_B1_2 (power), 6 PVIN_LDO1 (power), 7 VLDO1, 8 GPO1 (oc), 9 SDA (io), 10 SCL (in), 11 ~{INT} (oc), 12 VSEL_SD/VSEL_DDR (in), 13 VSYS (power), 14 VDD1P8, 15 AGND (power), 16 GPIO (io), 17 GPO2 (oc), 18 ~{RSTOUT} (oc), 19 VLDO2, 20 PVIN_LDO2 (power), 21 VLDO3, 22 PVIN_LDO34 (power), 23 VLDO4, 24 FB_B3 (in), 25 EN/PB/VSENSE (in), 26 PVIN_B3 (power), 27 LX_B3, 28 MODE/RESET (in), 29 LX_B2, 30 PVIN_B2 (power), 31 MODE/STBY (in), 32 FB_B2 (in), 33 PGND (power)

## TS-1187A
designator U?
Tactile switch SPST-NO 5.1x5.1 mm, 4 terminals (A=B, C=D)
pins: 1 A, 2 B, 3 C, 4 D

## TVS2200_DRV
designator U?
TVS2200 22 V flat-clamp surge protection, WSON-6 2x2
pins: 1 GND (power), 2 GND (power), 3 GND (power), 4 IN, 5 IN, 6 IN, 7 EP

## TVS_BI
designator U?
Bidirectional TVS / ESD diode
pins: 1, 2

## TYPE-C-31-M-12
designator U?
USB Type-C receptacle, USB 2.0 16-contact, SMD R/A, 4 THT shell pegs
pins: A1B12 GND, A4B9 VBUS, A5 CC1, A6 DP1, A7 DN1, A8 SBU1, B1A12 GND, B4A9 VBUS, B5 CC2, B6 DP2, B7 DN2, B8 SBU2, S1 SHIELD, S2 SHIELD, S3 SHIELD, S4 SHIELD

## USBLC6-2SC6
designator U?
USBLC6-2 2-line USB ESD array with VBUS clamp, SOT23-6L
pins: 1 I/O1, 2 GND (power), 3 I/O2, 4 I/O2, 5 VBUS (power), 6 I/O1

## X322512MSB4SI
designator U?
Crystal 3225 4-pad (1/3 crystal, 2/4 case GND)
pins: 1 X1, 2 GND, 3 X2, 4 GND

## XTAL2
designator U?
Crystal, 2-terminal
pins: 1, 2

## XTAL4_3225
designator U?
Crystal, 3.2x2.5 mm, 4 pads (1/3 crystal, 2/4 case GND)
pins: 1 X1, 2 GND, 3 X2, 4 GND

## XTAL_YSX321SL
designator U?
Crystal 3.2x2.5 mm 4-pad, YXC YSX321SL (1/3 crystal, 2/4 GND)
pins: 1 X1, 2 GND, 3 X2, 4 GND

## ZENER
designator U?
Zener diode (pin 1 = anode)
pins: 1 A, 2 K